# Altium footprint library SW_500SSP1S1M6QEA.PcbLib: 1 footprints
Each footprint in its own frame and in the unit in brackets; x right, y up, seen from the top. Pads: shape width x height; smd on the part's side, far side on the other; paste and mask are expansions set on the pad; w line width, h text height; cw(c..) or ccw(c..) is an arc to the next point about the centre after c.
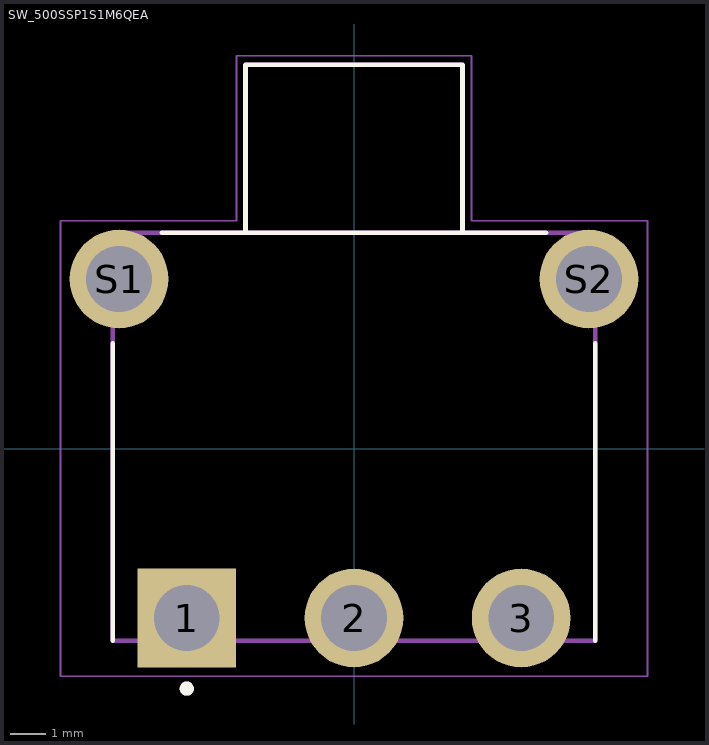
[diagram p0: the footprint, top view; thin cyan lines are the x and y axes]

## SW_500SSP1S1M6QEA [mm]
height 6.6
pads (5):
  rect 2.775x2.775 / inner round 2.775 / far side rect 2.775x2.775 hole 1.85 mask+0.102: 1(-4.7,-4.765)
  round 2.775 hole 1.85 mask+0.102: 2(0,-4.765) 3(4.7,-4.765) S1(-6.605,4.765) S2(6.605,4.765)
Top Overlay:
  circle w0.2: c-4.7,-6.75 r0.1
  lines w0.127: -6.785,-5.4 -6.785,2.964 ; -5.4,6.07 5.4,6.07 ; -3.05,6.075 -3.05,10.79 3.05,10.79 3.05,6.075 ; 6.785,-5.4 6.785,2.964
Assembly Top:
  circle w0.2: c-4.7,-6.75 r0.1
  lines w0.127: -3.05,6.07 -3.05,10.79 3.05,10.79 3.05,6.07 ; -3.05,6.07 -6.785,6.07 -6.785,-5.4 6.785,-5.4 6.785,6.07 3.05,6.07 ; -3.05,6.07 3.05,6.07
Courtyard Top:
  lines w0.05: -8.25,-6.405 -8.25,6.402 -3.3,6.402 -3.3,11.04 3.3,11.04 3.3,6.402 8.25,6.402 8.25,-6.405 -8.25,-6.405
3D body "step_temp.STEP": height 6.8, standoff -2.98, extent -6.785,-5.395 6.785,10.795